# Altium integrated library B560C-13-F.IntLib: 1 symbol
Pins are listed as number, name and electrical type; pins without a type are passive.

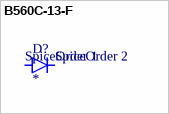
[diagram p0: symbol B560C-13-F]

## B560C-13-F
designator D?
Diode Schottky 60 V 5A Surface Mount SMC; MF: Diodes Inc.; MP: B560C-13-F; SnapEDA_Link: https://www.snapeda.com/parts/B560C-13-F/Diodes+Inc./view-part/?ref=snap; Package: SMC-2 Diodes; Value: *; Check_prices: https://www.snapeda.com/parts/B560C-13-F/Diodes+Inc./view-part/?ref=eda
footprint SMC
pins: A, C
text: SpiceOrder 1; SpiceOrder 2